# Altium schematic symbol library 150120RS75000.SchLib: 1 symbol
Pins are listed as number, name and electrical type; pins without a type are passive.

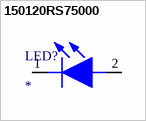
[diagram p0: symbol 150120RS75000]

## 150120RS75000
designator LED?
Red 625nm LED Indication - Discrete 2V 1206 (3216 Metric); MF: Wurth Electronics; MP: 150120RS75000; SnapEDA_Link: https://www.snapeda.com/parts/150120RS75000/Wurth+Electronics+Inc./view-part/?ref=snap; Package: 1206 Wurth Electronics; Value: *; Check_prices: https://www.snapeda.com/parts/150120RS75000/Wurth+Electronics+Inc./view-part/?ref=eda
footprint LEDC3216X78N
pins: 1 K (io), 2 A (io)